# Altium schematic symbol library EMI_Filter.SchLib: 6 symbols
Pins are listed as number, name and electrical type; pins without a type are passive.

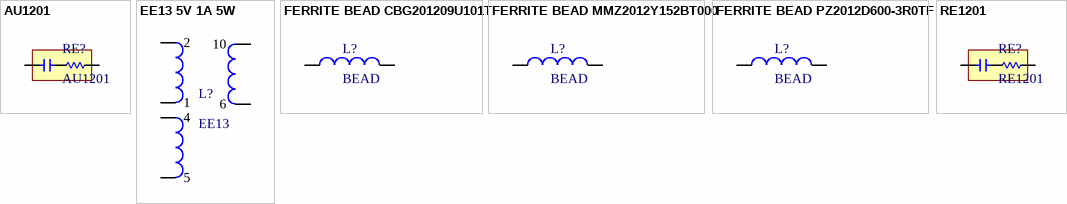
[diagram p0: symbols AU1201 to RE1201]

## AU1201
designator RE?
AU1201 RC filter 0.1uF 120R; Code: 1422-224; Designed by: TranLuyen
footprint AU1201 (20x8x17 mm)
footprint AU1201 mix RE1201 (20x8x17 mm)
pins: 1, 2

## EE13 5V 1A 5W
designator L?, comment EE13
BIẾN ÁP XUNG EE13 5V 1A 5W; Code: N/A
footprint BOBBIN_EE13/6/6
pins: 1, 2, 4, 5, 6, 10

## FERRITE BEAD CBG201209U101T
designator L?, comment BEAD
FERRITE BEAD 100 OHM 0805, Impedance @ Frequency: 100 Ohm @ 100MHz, Current Rating (Max): 500mA, DC Resistance (DCR) (Max): 180 mOhm; Code: 1025-302
footprint ferrite_bead_0805 (0805 (2012 Metric))
pins: 1, 2

## FERRITE BEAD MMZ2012Y152BT000
designator L?, comment BEAD
1.5 kOhms @ 100 MHz 1 Signal Line Ferrite Bead 0805 (2012 Metric) 500mA 400mOhm; Code: N/A
footprint ferrite_bead_0805 (0805 (2012 Metric))
pins: 1, 2

## FERRITE BEAD PZ2012D600-3R0TF
designator L?, comment BEAD
Ferrite Bead,0805 (2012 Metric),60Ohm@ 100MHz,0.02Ohm RDC,3000mA; Code: N/A
footprint ferrite_bead_0805 (0805 (2012 Metric))
pins: 1, 2

## RE1201
designator RE?
RE1201 RC filter 0.1uF 120R; Code: 1422-223; Designed by: TranLuyen
footprint RE1201 (17x8x15.5 mm)
pins: 1, 2